# Altium footprint library LED.PcbLib: 56 footprints (part 2 of 4)
Each footprint in its own frame and in the unit in brackets; x right, y up, seen from the top. Pads: shape width x height; smd on the part's side, far side on the other; paste and mask are expansions set on the pad; w line width, h text height; cw(c..) or ccw(c..) is an arc to the next point about the centre after c.
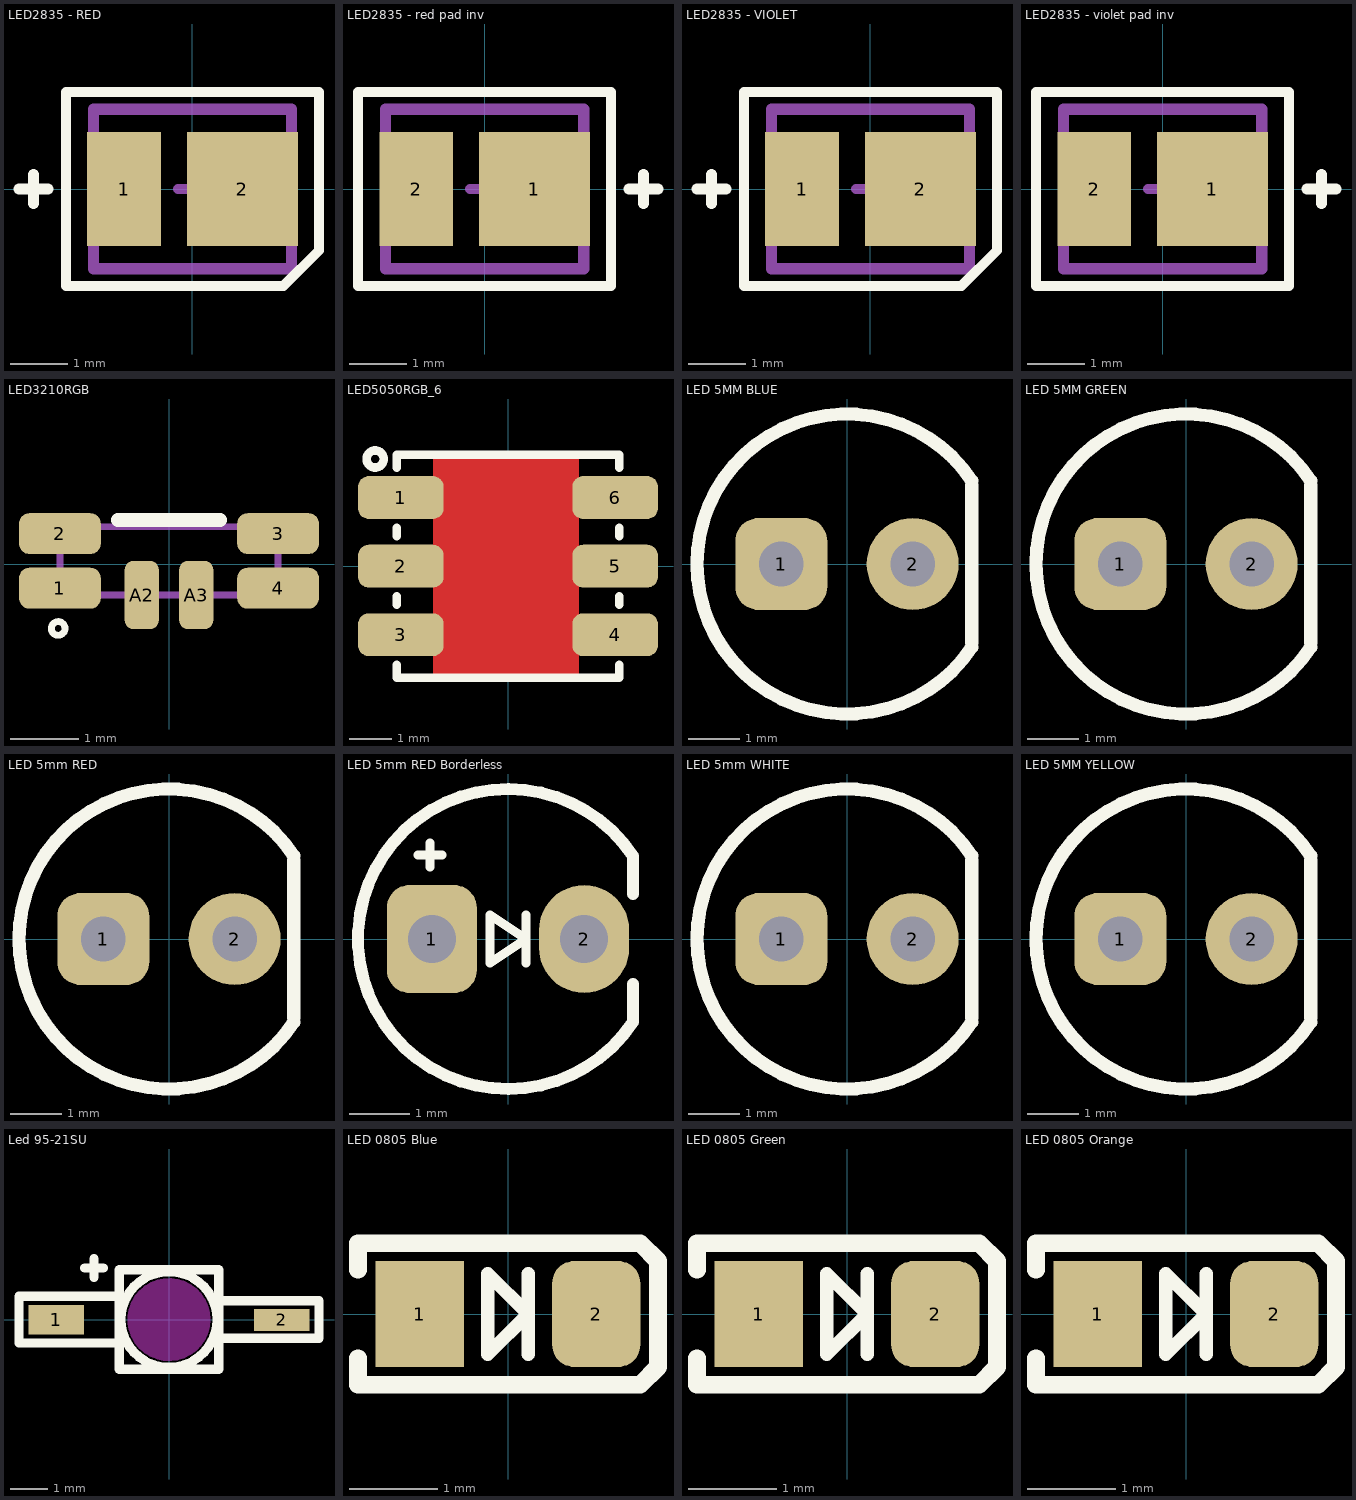
[diagram p1: the footprints below, top view; thin cyan lines are the x and y axes]

## LED2835 - RED [mm]
pads (2):
  rect 1.3x2 smd: 1(-1.2,0)
  rect 1.95x2 smd: 2(0.875,0)
Top Overlay:
  lines w0.178: -2.224,1.705 2.223,1.705 2.223,-1.079 1.597,-1.705 -2.223,-1.705 ; -2.224,1.705 -2.223,-1.705
  lines w0.2: -3.048,0 -2.54,0 ; -2.794,-0.254 -2.794,0.254
Top Designator:
  text ".Designator" at -4.128,-0.344 h1.52
Bottom Designator:
  lines w0.2: -1.74,-1.4 1.74,-1.4 1.74,1.4 -1.74,1.4 -1.74,-1.4
Mechanical 15:
  lines w0.178: -0.254,0 0.254,0 ; 0,-0.254 0,0.254
3D body "LED_RED_2835.STEP": height 0.7, standoff 0, extent -1.75,-1.4 1.75,1.4

## LED2835 - red pad inv [mm]
pads (2):
  rect 1.95x2 smd: 1(0.875,0)
  rect 1.3x2 smd: 2(-1.2,0)
Top Overlay:
  lines w0.178: -2.224,1.705 2.223,1.705 2.223,-1.705 -2.223,-1.705 ; -2.224,1.705 -2.223,-1.705
  lines w0.2: 2.54,0 3.048,0 ; 2.794,-0.254 2.794,0.254
Top Designator:
  text ".Designator" at -3.293,-0.344 h1.52
Bottom Designator:
  lines w0.2: -1.74,-1.4 -1.74,1.4 1.74,1.4 1.74,-1.4 -1.74,-1.4
Mechanical 15:
  lines w0.178: -0.254,0 0.254,0 ; 0,-0.254 0,0.254
3D body "LED_RED_2835.STEP": height 0.7, standoff 0, extent -1.75,-1.4 1.75,1.4

## LED2835 - VIOLET [mm]
pads (2):
  rect 1.3x2 smd: 1(-1.2,0)
  rect 1.95x2 smd: 2(0.875,0)
Top Overlay:
  lines w0.178: -2.224,1.705 2.223,1.705 2.223,-1.079 1.597,-1.705 -2.223,-1.705 ; -2.224,1.705 -2.223,-1.705
  lines w0.2: -3.048,0 -2.54,0 ; -2.794,-0.254 -2.794,0.254
Top Designator:
  text ".Designator" at -4.128,-0.344 h1.52
Bottom Designator:
  lines w0.2: -1.74,-1.4 1.74,-1.4 1.74,1.4 -1.74,1.4 -1.74,-1.4
Mechanical 15:
  lines w0.178: -0.254,0 0.254,0 ; 0,-0.254 0,0.254
3D body "LED_2835 violet.STEP": height 0.7, standoff 0, extent -1.75,-1.4 1.75,1.4

## LED2835 - violet pad inv [mm]
pads (2):
  rect 1.95x2 smd: 1(0.875,0)
  rect 1.3x2 smd: 2(-1.2,0)
Top Overlay:
  lines w0.178: -2.224,1.705 2.223,1.705 2.223,-1.705 -2.223,-1.705 ; -2.224,1.705 -2.223,-1.705
  lines w0.2: 2.54,0 3.048,0 ; 2.794,-0.254 2.794,0.254
Top Designator:
  text ".Designator" at -3.293,-0.344 h1.52
Bottom Designator:
  lines w0.2: -1.74,-1.4 1.74,-1.4 1.74,1.4 -1.74,1.4 -1.74,-1.4
Mechanical 15:
  lines w0.178: -0.254,0 0.254,0 ; 0,-0.254 0,0.254
3D body "LED_2835 violet.STEP": height 0.7, standoff 0, extent -1.75,-1.4 1.75,1.4

## LED3210RGB [mm] "LED RGB 3.2mmX1.0mm"
height 2.8
pads (6):
  rrect50% 1.2x0.6 smd mask+0.075: 1(-1.6,-0.35) 2(-1.6,0.45) 3(1.6,0.45) 4(1.6,-0.35)
  rrect50% 0.5x1 smd mask+0.075: A2(-0.4,-0.45) A3(0.4,-0.45)
Top Overlay:
  lines w0.1: -1.526,-0.952 cw(c-1.626,-0.941) -1.526,-0.941
  lines w0.2: -0.75,0.65 0.75,0.65
Top Designator:
  text ".Designator" at -3.71,-0.477 h1.52
Mechanical 13:
  lines w0.1: -1.6,-0.45 1.6,-0.45 1.6,0.55 -1.6,0.55 -1.6,-0.45
3D body "LED3210.step": height 1.49, standoff -0.01, extent -1.6,-0.45 1.6,0.55

## LED5050RGB_6 [mm] "LED 5mmX5mm, PLLC6"
pads (6):
  rrect50% 2x1 smd paste-0.109 mask+0.1: 1(-2.5,1.6) 2(-2.5,0) 3(-2.5,-1.6) 4(2.5,-1.6) 5(2.5,0) 6(2.5,1.6)
Top Layer:
  pour cut-out: -1.75,2.54 1.65,2.54 1.65,-2.54 -1.75,-2.54
Top Overlay:
  circle w0.2: c-3.1,2.5 r0.2
  lines w0.2: -2.6,-2.3 -2.6,-2.6 2.6,-2.6 2.6,-2.3 ; -2.6,-0.9 -2.6,-0.7 ; -2.6,0.7 -2.6,0.9 ; -2.6,2.3 -2.6,2.6 2.6,2.6 2.6,2.3 ; 2.6,-0.9 2.6,-0.7 ; 2.6,0.7 2.6,0.9
3D body "User Library-APA102C_RGB.step": height 1.55, standoff 0, extent -2.75,-2.5 2.75,2.5

## LED 5MM BLUE [mil]
pads (2):
  rrect50% 70x70 hole 34: 1(-50,0)
  round 70 hole 34: 2(50,0)
Top Overlay:
  lines w10: 95,-63.33 cw(c0,0) 95,63.33 ; 95,-60 95,60
Top Designator:
  text ".Designator" at -155.66,-13.54 h60
3D body "LED D5 - Blue_cutted.step": height 338.58, standoff -200.79, extent -115.69,-115.96 98.42,115.95

## LED 5MM GREEN [mil]
pads (2):
  rrect50% 70x70 hole 34: 1(-50,0)
  round 70 hole 34: 2(50,0)
Top Overlay:
  lines w10: 95,-63.33 cw(c0,0) 95,63.33 ; 95,-60 95,60
Top Designator:
  text ".Designator" at -155.66,-13.54 h60
3D body "LED 5mm Green.step": height 343.5, standoff -117.13, extent -112.71,-114.07 99.43,114.08

## LED 5mm RED [mil]
pads (2):
  rrect50% 70x70 hole 34: 1(-50,0)
  round 70 hole 34: 2(50,0)
Top Overlay:
  lines w10: 95,-63.33 cw(c0,0) 95,63.33 ; 95,-60 95,60
Top Designator:
  text ".Designator" at -155.66,-13.54 h60
3D body "LED D5 - Red_cutted.step": height 338.58, standoff -200.79, extent -115.68,-115.96 98.42,115.95

## LED 5mm RED Borderless [mm]
pads (2):
  rrect50% 1.5x1.8 hole 0.8: 1(-1.27,0)
  oval 1.5x1.8 hole 0.8: 2(1.27,0)
Top Overlay:
  lines w0.15: -1.5,1.4 -1.1,1.4 ; -1.3,1.2 -1.3,1.6 ; 0.3,-0.4 0.3,0.4 ; -0.3,-0.4 -0.3,0.4 0.3,0 -0.3,-0.4
  lines w0.2: 2.08,-0.75 2.08,-1.387 cw(c0,0) 2.08,1.387 2.08,0.75
Top Designator:
  text ".Designator" at -3.93,-0.344 h1.52
3D body "LED D5 - Red_cutted.step": height 8.6, standoff -5.1, extent -2.938,-2.945 2.5,2.945

## LED 5mm WHITE [mil]
pads (2):
  rrect50% 70x70 hole 34: 1(-50,0)
  round 70 hole 34: 2(50,0)
Top Overlay:
  lines w10: 95,-63.33 cw(c0,0) 95,63.33 ; 95,-60 95,60
Top Designator:
  text ".Designator" at -155.66,-13.54 h60
3D body "LED D5 - White_cutted.step": height 338.58, standoff -200.79, extent -115.68,-115.95 98.43,115.95

## LED 5MM YELLOW [mil]
pads (2):
  rrect50% 70x70 hole 34: 1(-50,0)
  round 70 hole 34: 2(50,0)
Top Overlay:
  lines w10: 95,-63.33 cw(c0,0) 95,63.33 ; 95,-60 95,60
Top Designator:
  text ".Designator" at -155.66,-13.54 h60
3D body "LED D5 - Yellow_cutted.step": height 338.58, standoff -200.79, extent -116.68,-116.96 97.42,114.95

## Led 95-21SU [mm]
pads (2):
  rect 1.5x0.8 smd: 1(-3.05,-0.008)
  rect 1.5x0.6 smd: 2(3.05,-0.008)
Top Overlay:
  circle w0.254: c0,0 r1.3
  lines w0.254: -2.286,1.397 -1.778,1.397 ; -2.032,1.143 -2.032,1.651 ; -1.397,-0.635 -4.064,-0.635 -4.064,0.635 -1.397,0.635 ; 1.397,-0.508 4.064,-0.508 ; 1.397,0.508 4.064,0.508 ; 4.064,-0.5 4.064,0.5 ; -1.35,-1.35 1.35,-1.35 1.35,1.35 -1.35,1.35 -1.35,-1.35
Keep-Out Layer:
  board cut-out: 0,-1 -0.098,-1 -0.292,-0.962 -0.474,-0.886 -0.637,-0.777 -0.777,-0.637 -0.886,-0.474 -0.962,-0.292 -1,-0.098 -1,0 -1,0.098 -0.962,0.292 -0.886,0.474 -0.777,0.637 -0.637,0.777 -0.474,0.886 -0.292,0.962 -0.098,1 0,1 0.098,1 0.292,0.962 0.474,0.886 0.637,0.777 0.777,0.637 0.886,0.474 0.962,0.292 1,0.098 1,0 1,-0.098 0.962,-0.292 0.886,-0.474 0.777,-0.637 0.637,-0.777 0.474,-0.886 0.292,-0.962 0.098,-1
Keep-Out Layer:
  circle w0.254: c0,0 r1
Top Designator:
  text ".Designator" at -3.71,-0.193 h1.52

## LED 0805 Blue [mm]
pads (2):
  rect 1x1.2 smd: 1(-1,0)
  rrect50% 1x1.2 smd: 2(1,0)
Top Overlay:
  lines w0.15: -0.229,-0.457 0.229,0 ; -0.229,-0.457 -0.229,0.457 ; -0.229,-0.457 0.229,0 ; -0.229,-0.457 -0.229,0.457 ; -0.229,0.457 0.229,0 ; -0.229,0.457 0.229,0 ; 0.229,-0.457 0.229,0.457 0.229,-0.457
  lines w0.2: -1.7,-0.5 -1.7,-0.8 1.5,-0.8 1.7,-0.6 1.7,0.6 1.5,0.8 -1.7,0.8 -1.7,0.5
Top Designator:
  text ".Designator" at -3.71,-0.344 h1.52
3D body "LED 0805 Lens BLUE.STEP": height 0.9, standoff 0.3, extent -0.65,-0.625 0.65,0.625
3D body "LED 0805 Base BLUE.STEP": height 0.4, standoff 0, extent -1,-0.625 1,0.625

## LED 0805 Green [mm]
pads (2):
  rect 1x1.2 smd: 1(-1,0)
  rrect50% 1x1.2 smd: 2(1,0)
Top Overlay:
  lines w0.15: -0.229,-0.457 0.229,0 ; -0.229,-0.457 -0.229,0.457 ; -0.229,-0.457 0.229,0 ; -0.229,-0.457 -0.229,0.457 ; -0.229,0.457 0.229,0 ; -0.229,0.457 0.229,0 ; 0.229,-0.457 0.229,0.457 0.229,-0.457
  lines w0.2: -1.7,-0.5 -1.7,-0.8 1.5,-0.8 1.7,-0.6 1.7,0.6 1.5,0.8 -1.7,0.8 -1.7,0.5
Top Designator:
  text ".Designator" at -3.71,-0.344 h1.52
3D body "LED 0805 Base GREEN.STEP": height 0.4, standoff 0, extent -1,-0.625 1,0.625
3D body "LED 0805 Lens GREEN.STEP": height 0.9, standoff 0.3, extent -0.65,-0.625 0.65,0.625

## LED 0805 Orange [mm]
pads (2):
  rect 1x1.2 smd: 1(-1,0)
  rrect50% 1x1.2 smd: 2(1,0)
Top Overlay:
  lines w0.15: -0.229,-0.457 -0.229,0.457 ; -0.229,-0.457 0.229,0 ; -0.229,-0.457 -0.229,0.457 ; -0.229,-0.457 0.229,0 ; -0.229,0.457 0.229,0 ; -0.229,0.457 0.229,0 ; 0.229,-0.457 0.229,0.457 0.229,-0.457
  lines w0.2: -1.7,-0.5 -1.7,-0.8 1.5,-0.8 1.7,-0.6 1.7,0.6 1.5,0.8 -1.7,0.8 -1.7,0.5
Top Designator:
  text ".Designator" at -3.71,-0.344 h1.52
3D body "User Library-led_0805-orange.step": height 1.1, standoff 0, extent -1.004,-0.625 1.016,0.625